# Altium footprint library WCAP-AIG5.PcbLib: 22 footprints (part 2 of 2)
Each footprint in its own frame and in the unit in brackets; x right, y up, seen from the top. Pads: shape width x height; smd on the part's side, far side on the other; paste and mask are expansions set on the pad; w line width, h text height; cw(c..) or ccw(c..) is an arc to the next point about the centre after c.
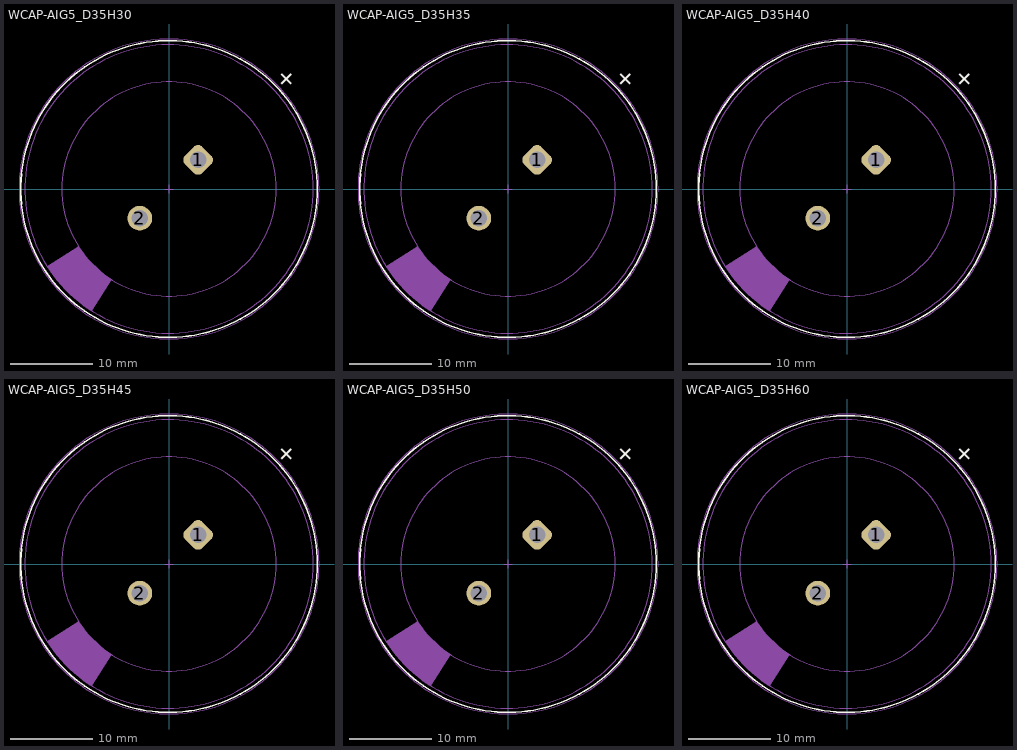
[diagram p1: the footprints below, top view; thin cyan lines are the x and y axes]

## WCAP-AIG5_D35H30 [mm] "Aluminium Electrolytic Snap-In Capacitors"
height 30
pads (2):
  rrect50% 3x3 hole 2 rot 45: 1(3.536,3.536)
  round 3 hole 2: 2(-3.536,-3.536)
Top Overlay:
  circle w0.2: c0,0 r18
  text "+" at 14.036,11.915 h2
Top Assembly:
  circle w0.1: c0,0 r13
  circle w0.1: c0,0 r17.5
  region: -9.394,-14.765 -6.977,-10.969 -6.978,-10.968 -7.276,-10.773 -7.854,-10.359 -8.408,-9.915 -8.938,-9.44 -9.44,-8.938 -9.915,-8.408 -10.359,-7.854 -10.773,-7.276 -10.968,-6.978 -10.969,-6.977 -14.765,-9.394 -14.508,-9.798 -13.951,-10.576 -13.352,-11.323 -12.713,-12.036 -12.036,-12.713 -11.323,-13.352 -10.576,-13.951 -9.798,-14.508
Top Designator:
  text ".Designator" at -3.647,-0.357 h1
Top 3D Body:
  circle w0.1: c0,0 r13
  circle w0.1: c0,0 r17.5
  region: -9.394,-14.765 -6.977,-10.969 -6.978,-10.968 -7.276,-10.773 -7.854,-10.359 -8.408,-9.915 -8.938,-9.44 -9.44,-8.938 -9.915,-8.408 -10.359,-7.854 -10.773,-7.276 -10.968,-6.978 -10.969,-6.977 -14.765,-9.394 -14.508,-9.798 -13.951,-10.576 -13.352,-11.323 -12.713,-12.036 -12.036,-12.713 -11.323,-13.352 -10.576,-13.951 -9.798,-14.508
Top Courtyard:
  circle w0.05: c0,0 r18.2
Top Component Center:
  lines w0.1: -0.5,0 0.5,0 ; 0,-0.5 0,0.5
3D body "WCAP-AIG5_35x30.stp": height 30.09, standoff -6.05, extent -17.5,-17.5 17.5,17.5

## WCAP-AIG5_D35H35 [mm] "Aluminium Electrolytic Snap-In Capacitors"
height 35
pads (2):
  rrect50% 3x3 hole 2 rot 45: 1(3.536,3.536)
  round 3 hole 2: 2(-3.536,-3.536)
Top Overlay:
  circle w0.2: c0,0 r18
  text "+" at 14.036,11.915 h2
Top Assembly:
  circle w0.1: c0,0 r13
  circle w0.1: c0,0 r17.5
  region: -9.394,-14.765 -6.977,-10.969 -6.978,-10.968 -7.276,-10.773 -7.854,-10.359 -8.408,-9.915 -8.938,-9.44 -9.44,-8.938 -9.915,-8.408 -10.359,-7.854 -10.773,-7.276 -10.968,-6.978 -10.969,-6.977 -14.765,-9.394 -14.508,-9.798 -13.951,-10.576 -13.352,-11.323 -12.713,-12.036 -12.036,-12.713 -11.323,-13.352 -10.576,-13.951 -9.798,-14.508
Top Designator:
  text ".Designator" at -3.647,-0.357 h1
Top 3D Body:
  circle w0.1: c0,0 r13
  circle w0.1: c0,0 r17.5
  region: -9.394,-14.765 -6.977,-10.969 -6.978,-10.968 -7.276,-10.773 -7.854,-10.359 -8.408,-9.915 -8.938,-9.44 -9.44,-8.938 -9.915,-8.408 -10.359,-7.854 -10.773,-7.276 -10.968,-6.978 -10.969,-6.977 -14.765,-9.394 -14.508,-9.798 -13.951,-10.576 -13.352,-11.323 -12.713,-12.036 -12.036,-12.713 -11.323,-13.352 -10.576,-13.951 -9.798,-14.508
Top Courtyard:
  circle w0.05: c0,0 r18.2
Top Component Center:
  lines w0.1: -0.5,0 0.5,0 ; 0,-0.5 0,0.5
3D body "35x35.stp": height 35.09, standoff -6.05, extent -17.499,-17.5 17.496,17.492

## WCAP-AIG5_D35H40 [mm] "Aluminium Electrolytic Snap-In Capacitors"
height 40
pads (2):
  rrect50% 3x3 hole 2 rot 45: 1(3.536,3.536)
  round 3 hole 2: 2(-3.536,-3.536)
Top Overlay:
  circle w0.2: c0,0 r18
  text "+" at 14.036,11.915 h2
Top Assembly:
  circle w0.1: c0,0 r13
  circle w0.1: c0,0 r17.5
  region: -9.394,-14.765 -6.977,-10.969 -6.978,-10.968 -7.276,-10.773 -7.854,-10.359 -8.408,-9.915 -8.938,-9.44 -9.44,-8.938 -9.915,-8.408 -10.359,-7.854 -10.773,-7.276 -10.968,-6.978 -10.969,-6.977 -14.765,-9.394 -14.508,-9.798 -13.951,-10.576 -13.352,-11.323 -12.713,-12.036 -12.036,-12.713 -11.323,-13.352 -10.576,-13.951 -9.798,-14.508
Top Designator:
  text ".Designator" at -3.647,-0.357 h1
Top 3D Body:
  circle w0.1: c0,0 r13
  circle w0.1: c0,0 r17.5
  region: -9.394,-14.765 -6.977,-10.969 -6.978,-10.968 -7.276,-10.773 -7.854,-10.359 -8.408,-9.915 -8.938,-9.44 -9.44,-8.938 -9.915,-8.408 -10.359,-7.854 -10.773,-7.276 -10.968,-6.978 -10.969,-6.977 -14.765,-9.394 -14.508,-9.798 -13.951,-10.576 -13.352,-11.323 -12.713,-12.036 -12.036,-12.713 -11.323,-13.352 -10.576,-13.951 -9.798,-14.508
Top Courtyard:
  circle w0.05: c0,0 r18.2
Top Component Center:
  lines w0.1: -0.5,0 0.5,0 ; 0,-0.5 0,0.5
3D body "WCAP-AIG5_35x40.stp": height 40.09, standoff -6.05, extent -17.478,-17.5 17.496,17.498

## WCAP-AIG5_D35H45 [mm] "Aluminium Electrolytic Snap-In Capacitors"
height 45
pads (2):
  rrect50% 3x3 hole 2 rot 45: 1(3.536,3.536)
  round 3 hole 2: 2(-3.536,-3.536)
Top Overlay:
  circle w0.2: c0,0 r18
  text "+" at 14.036,11.915 h2
Top Assembly:
  circle w0.1: c0,0 r13
  circle w0.1: c0,0 r17.5
  region: -9.394,-14.765 -6.977,-10.969 -6.978,-10.968 -7.276,-10.773 -7.854,-10.359 -8.408,-9.915 -8.938,-9.44 -9.44,-8.938 -9.915,-8.408 -10.359,-7.854 -10.773,-7.276 -10.968,-6.978 -10.969,-6.977 -14.765,-9.394 -14.508,-9.798 -13.951,-10.576 -13.352,-11.323 -12.713,-12.036 -12.036,-12.713 -11.323,-13.352 -10.576,-13.951 -9.798,-14.508
Top Designator:
  text ".Designator" at -3.647,-0.357 h1
Top 3D Body:
  circle w0.1: c0,0 r13
  circle w0.1: c0,0 r17.5
  region: -9.394,-14.765 -6.977,-10.969 -6.978,-10.968 -7.276,-10.773 -7.854,-10.359 -8.408,-9.915 -8.938,-9.44 -9.44,-8.938 -9.915,-8.408 -10.359,-7.854 -10.773,-7.276 -10.968,-6.978 -10.969,-6.977 -14.765,-9.394 -14.508,-9.798 -13.951,-10.576 -13.352,-11.323 -12.713,-12.036 -12.036,-12.713 -11.323,-13.352 -10.576,-13.951 -9.798,-14.508
Top Courtyard:
  circle w0.05: c0,0 r18.2
Top Component Center:
  lines w0.1: -0.5,0 0.5,0 ; 0,-0.5 0,0.5
3D body "WCAP-AIG5_35x45.stp": height 45.09, standoff -6.05, extent -17.496,-17.5 17.49,17.494

## WCAP-AIG5_D35H50 [mm] "Aluminium Electrolytic Snap-In Capacitors"
height 50
pads (2):
  rrect50% 3x3 hole 2 rot 45: 1(3.536,3.536)
  round 3 hole 2: 2(-3.536,-3.536)
Top Overlay:
  circle w0.2: c0,0 r18
  text "+" at 14.036,11.915 h2
Top Assembly:
  circle w0.1: c0,0 r17.5
  circle w0.1: c0,0 r13
  region: -9.394,-14.765 -6.977,-10.969 -6.978,-10.968 -7.276,-10.773 -7.854,-10.359 -8.408,-9.915 -8.938,-9.44 -9.44,-8.938 -9.915,-8.408 -10.359,-7.854 -10.773,-7.276 -10.968,-6.978 -10.969,-6.977 -14.765,-9.394 -14.508,-9.798 -13.951,-10.576 -13.352,-11.323 -12.713,-12.036 -12.036,-12.713 -11.323,-13.352 -10.576,-13.951 -9.798,-14.508
Top Designator:
  text ".Designator" at -3.647,-0.357 h1
Top 3D Body:
  circle w0.1: c0,0 r17.5
  circle w0.1: c0,0 r13
  region: -9.394,-14.765 -6.977,-10.969 -6.978,-10.968 -7.276,-10.773 -7.854,-10.359 -8.408,-9.915 -8.938,-9.44 -9.44,-8.938 -9.915,-8.408 -10.359,-7.854 -10.773,-7.276 -10.968,-6.978 -10.969,-6.977 -14.765,-9.394 -14.508,-9.798 -13.951,-10.576 -13.352,-11.323 -12.713,-12.036 -12.036,-12.713 -11.323,-13.352 -10.576,-13.951 -9.798,-14.508
Top Courtyard:
  circle w0.05: c0,0 r18.2
Top Component Center:
  lines w0.1: -0.5,0 0.5,0 ; 0,-0.5 0,0.5
3D body "35x50.stp": height 50.09, standoff -6.05, extent -17.5,-17.5 17.5,17.5

## WCAP-AIG5_D35H60 [mm] "Aluminium Electrolytic Snap-In Capacitors"
height 60
pads (2):
  rrect50% 3x3 hole 2 rot 45: 1(3.536,3.536)
  round 3 hole 2: 2(-3.536,-3.536)
Top Overlay:
  circle w0.2: c0,0 r18
  text "+" at 14.036,11.915 h2
Top Assembly:
  circle w0.1: c0,0 r13
  circle w0.1: c0,0 r17.5
  region: -9.394,-14.765 -6.977,-10.969 -6.978,-10.968 -7.276,-10.773 -7.854,-10.359 -8.408,-9.915 -8.938,-9.44 -9.44,-8.938 -9.915,-8.408 -10.359,-7.854 -10.773,-7.276 -10.968,-6.978 -10.969,-6.977 -14.765,-9.394 -14.508,-9.798 -13.951,-10.576 -13.352,-11.323 -12.713,-12.036 -12.036,-12.713 -11.323,-13.352 -10.576,-13.951 -9.798,-14.508
Top Designator:
  text ".Designator" at -3.647,-0.357 h1
Top 3D Body:
  circle w0.1: c0,0 r13
  circle w0.1: c0,0 r17.5
  region: -9.394,-14.765 -6.977,-10.969 -6.978,-10.968 -7.276,-10.773 -7.854,-10.359 -8.408,-9.915 -8.938,-9.44 -9.44,-8.938 -9.915,-8.408 -10.359,-7.854 -10.773,-7.276 -10.968,-6.978 -10.969,-6.977 -14.765,-9.394 -14.508,-9.798 -13.951,-10.576 -13.352,-11.323 -12.713,-12.036 -12.036,-12.713 -11.323,-13.352 -10.576,-13.951 -9.798,-14.508
Top Courtyard:
  circle w0.05: c0,0 r18.2
Top Component Center:
  lines w0.1: -0.5,0 0.5,0 ; 0,-0.5 0,0.5
3D body "WCAP-AIG5_35x60.stp": height 60.09, standoff -6.05, extent -17.481,-17.5 17.475,17.475